# Altium footprint library ISP2454-LX_Libraries.PcbLib: 1 footprints
Each footprint in its own frame and in the unit in brackets; x right, y up, seen from the top. Pads: shape width x height; smd on the part's side, far side on the other; paste and mask are expansions set on the pad; w line width, h text height; cw(c..) or ccw(c..) is an arc to the next point about the centre after c.
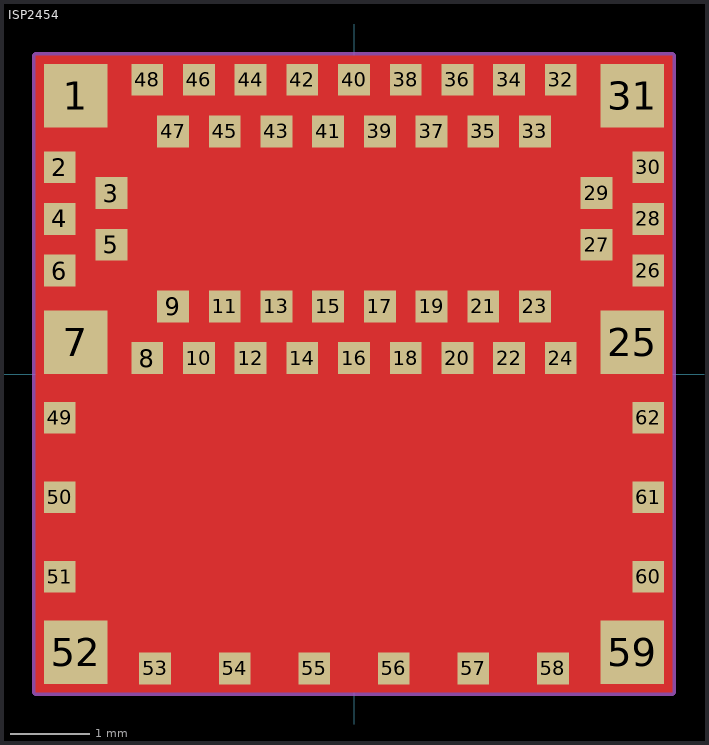
[diagram p0: the footprint, top view; thin cyan lines are the x and y axes]

## ISP2454 [mm] "Footprint of ISP2454"
pads (62):
  rect 0.8x0.8 smd mask+0.05: 1(-3.5,3.5) 7(-3.5,0.4) 25(3.5,0.4) 31(3.5,3.5) 52(-3.5,-3.5) 59(3.5,-3.5)
  rect 0.4x0.4 smd mask+0.05: 2(-3.7,2.6) 3(-3.05,2.275) 4(-3.7,1.95) 5(-3.05,1.625) 6(-3.7,1.3) 8(-2.6,0.2) 9(-2.275,0.85) 10(-1.95,0.2) 11(-1.625,0.85) 12(-1.3,0.2) 13(-0.975,0.85) 14(-0.65,0.2) 15(-0.325,0.85) 16(0,0.2) 17(0.325,0.85) 18(0.65,0.2) 19(0.975,0.85) 20(1.3,0.2) 21(1.625,0.85) 22(1.95,0.2) 23(2.275,0.85) 24(2.6,0.2) 26(3.7,1.3) 27(3.05,1.625) 28(3.7,1.95) 29(3.05,2.275) 30(3.7,2.6) 32(2.6,3.7) 33(2.275,3.05) 34(1.95,3.7) 35(1.625,3.05) 36(1.3,3.7) 37(0.975,3.05) 38(0.65,3.7) 39(0.325,3.05) 40(0,3.7) 41(-0.325,3.05) 42(-0.65,3.7) 43(-0.975,3.05) 44(-1.3,3.7) 45(-1.625,3.05) 46(-1.95,3.7) 47(-2.275,3.05) 48(-2.6,3.7) 49(-3.7,-0.55) 50(-3.7,-1.55) 51(-3.7,-2.55) 53(-2.5,-3.7) 54(-1.5,-3.7) 55(-0.5,-3.7) 56(0.5,-3.7) 57(1.5,-3.7) 58(2.5,-3.7) 60(3.7,-2.55) 61(3.7,-1.55) 62(3.7,-0.55)
Top Layer:
  pour cut-out: -4,-4 4,-4 4,4 -4,4
Top Component Outline:
  lines w0.1: -4,-4 -4,4 4,4 4,-4 -4,-4
Top Courtyard:
  lines w0.1: -0.5,-1.5 0.5,-1.5 ; 0,-2 0,-1
3D body: height 1.1, standoff 0, extent -4.011,-0.225 4.011,3.994
3D body: height 1.11, standoff 0.1, extent -3.825,3.225 -3.225,3.825
3D body: height 1.1, standoff 0, extent -4,-3.994 4,-0.225